# Altium footprint library MyPCBLib.PcbLib: 103 footprints (part 2 of 7)
Each footprint in its own frame and in the unit in brackets; x right, y up, seen from the top. Pads: shape width x height; smd on the part's side, far side on the other; paste and mask are expansions set on the pad; w line width, h text height; cw(c..) or ccw(c..) is an arc to the next point about the centre after c.
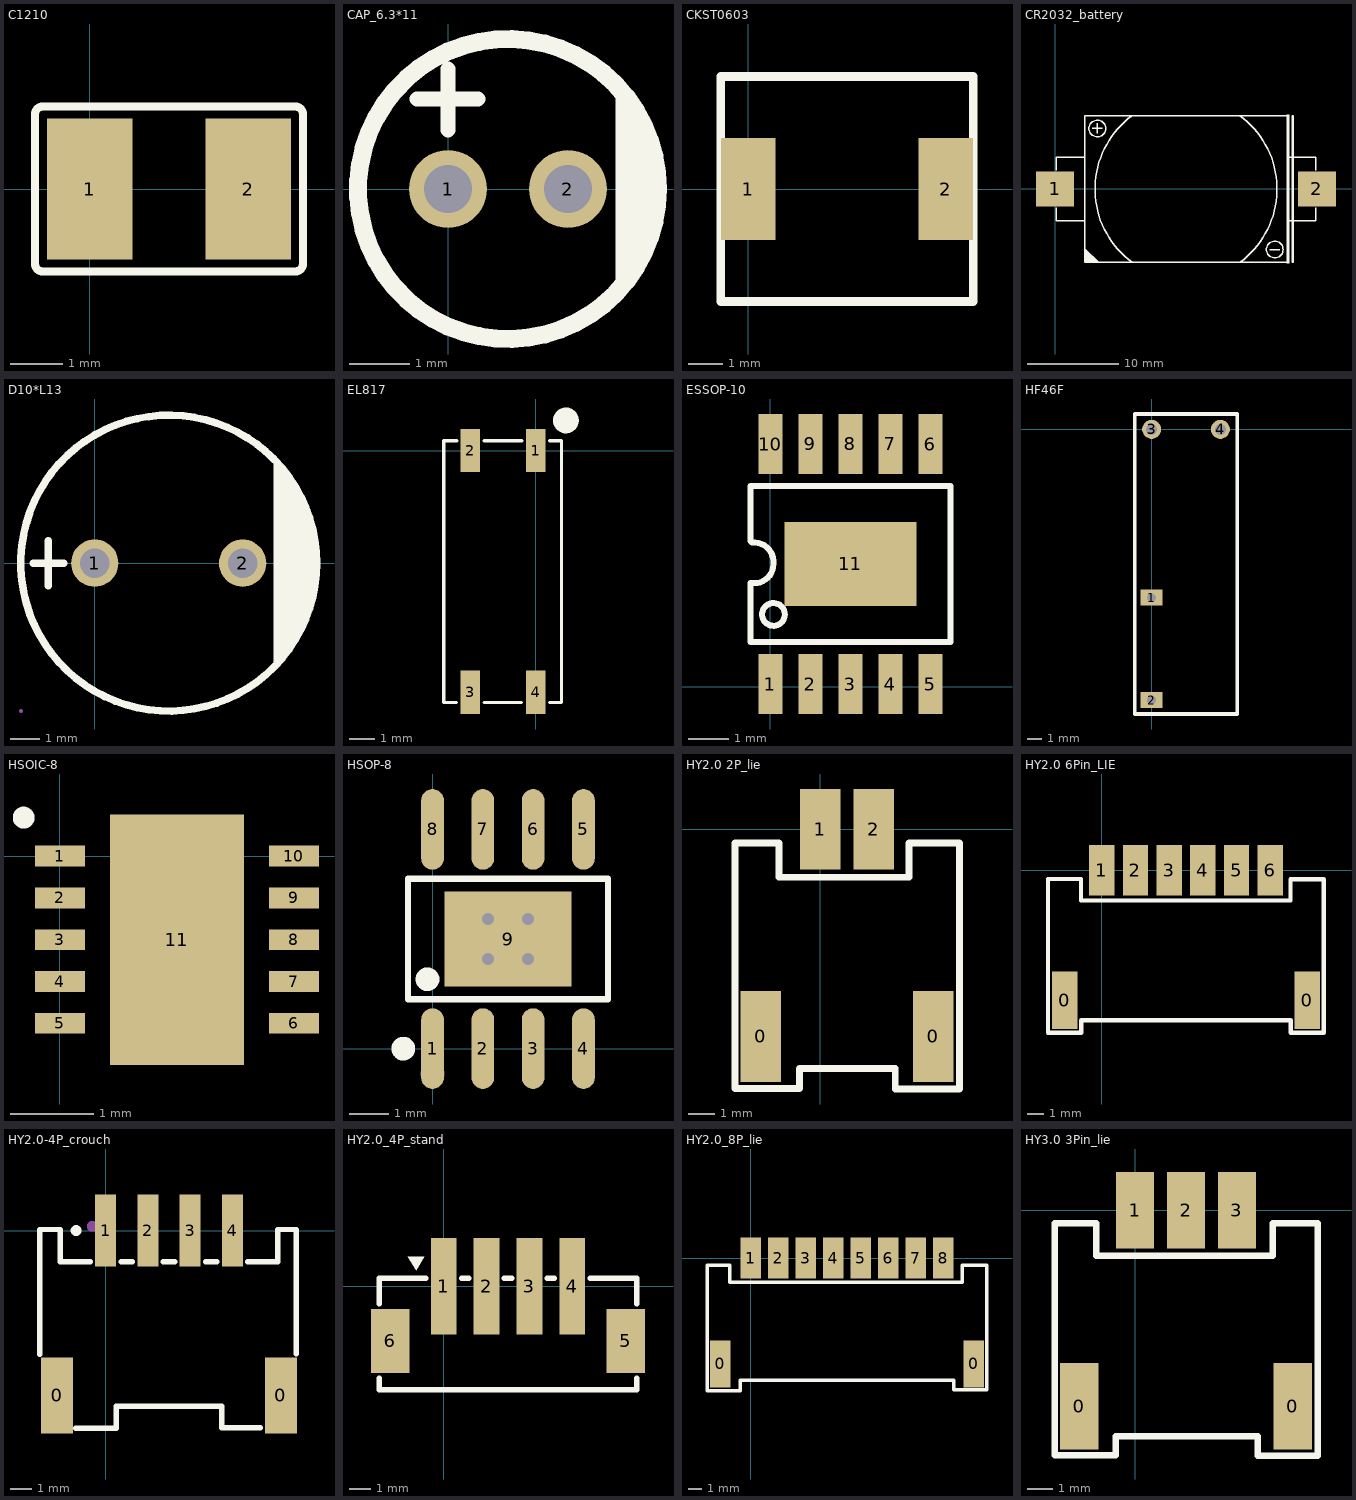
[diagram p1: the footprints below, top view; thin cyan lines are the x and y axes]

## C1210 [mm]
pads (2):
  rect 1.635x2.7 smd paste-100 mask+0.051: 1(0,0) 2(3.035,0)
Top Overlay:
  lines w0.152: -1.046,-1.426 ccw(c-0.894,-1.426) -0.894,-1.579 0.741,-1.579 2.294,-1.579 3.929,-1.579 ccw(c3.929,-1.426) 4.081,-1.426 4.081,1.426 ccw(c3.929,1.426) 3.929,1.579 2.294,1.579 0.741,1.579 -0.894,1.579 ccw(c-0.894,1.426) -1.046,1.426 -1.046,-1.426
Top Paste:
  region: 2.217,-1.25 2.217,-0.559 2.317,-0.459 2.673,-0.459 2.773,-0.359 2.773,0.359 2.673,0.459 2.317,0.459 2.217,0.559 2.217,1.25 2.317,1.35 3.752,1.35 3.852,1.25 3.852,-1.25 3.752,-1.35 2.317,-1.35
  region: 0.817,-1.25 0.817,-0.559 0.717,-0.459 0.361,-0.459 0.261,-0.359 0.261,0.359 0.361,0.459 0.717,0.459 0.817,0.559 0.817,1.25 0.717,1.35 -0.718,1.35 -0.818,1.25 -0.818,-1.25 -0.718,-1.35 0.717,-1.35

## CAP_6.3*11 [mm]
pads (2):
  round 1.3 hole 0.8: 1(0,0) 2(2,0)
Top Overlay:
  circle w0.3: c1,0 r2.5
  region: 2.794,1.651 2.961,1.491 3.225,1.111 3.407,0.685 3.5,0.231 3.5,-0.231 3.407,-0.685 3.225,-1.111 2.961,-1.491 2.794,-1.651
  lines w0.254: -0.516,1.5 0.5,1.5 ; 0,0.984 0,2

## CKST0603 [mm]
pads (2):
  rect 1.6x3 smd: 1(0,0) 2(5.8,0)
Top Overlay:
  lines w0.254: -0.8,-3.3 6.6,-3.3 6.6,3.3 -0.8,3.3 -0.8,-3.3
3D body: height 3, standoff 0, extent -0.8,-3.3 6.6,3.3

## CR2032_battery [mm]
pads (2):
  rect 4.2x3.8 smd: 1(0,0) 2(28.77,0)
Top Overlay:
  circle w0.152: c24.135,-6.65 r0.918
  circle w0.152: c4.635,6.65 r0.918
  region: 4.733,-8.076 3.259,-8.076 3.259,-6.604
  region: 25.435,8.152 25.435,1.932 25.74,1.932 25.74,8.152
  region: 25.435,-8.152 25.435,1.95 25.735,2 25.74,-1.932 25.74,-8.152
  lines w0.152: 0.135,-2.08 0.135,-3.5 3.259,-3.5 ; 0.135,2.08 0.135,3.5 3.259,3.5 ; 3.259,-6.614 4.721,-8.076 4.745,-8.076 ; 3.259,1.983 3.259,8.076 25.511,8.076 ; 3.259,2.057 3.259,-1.983 3.259,-8.076 25.511,-8.076 ; 4.085,6.65 5.185,6.65 ; 4.635,6.1 4.635,7.2 ; 8.48,-8.07 cw(c14.385,0) 8.489,8.077 ; 20.281,-8.077 ccw(c14.385,0) 20.29,8.07 ; 23.585,-6.65 24.685,-6.65 ; 25.511,-3.5 28.635,-3.5 28.635,-2.08 ; 25.511,3.5 28.635,3.5 28.635,2.08 ; 26.185,-8.074 26.035,-8.074 26.035,8.076 26.185,8.076 ; 26.185,-8.05 26.185,8.052

## D10*L13 [mm]
pads (2):
  round 1.6 hole 1 mask+0.05: 1(0,0) 2(5,0)
Top Overlay:
  circle w0.254: c2.5,0 r5
  region: 6.055,3.556 6.055,-3.556 6.817,-2.54 7.325,-1.016 7.579,0.508 7.325,1.524
  lines w0.254: -2.073,0 -1.057,0 ; -1.565,-0.762 -1.565,0.762
Mechanical 15:
  region: 0.3,0 0.3,0.06 0.254,0.17 0.17,0.254 0.059,0.3 -0.06,0.3 -0.17,0.254 -0.255,0.17 -0.3,0.06 -0.3,0 -0.3,-0.06 -0.255,-0.17 -0.17,-0.254 -0.06,-0.3 0.059,-0.3 0.17,-0.254 0.254,-0.17 0.3,-0.06
  region: 5.3,0 5.3,0.06 5.254,0.17 5.17,0.254 5.059,0.3 4.94,0.3 4.83,0.254 4.745,0.17 4.7,0.06 4.7,0 4.7,-0.06 4.745,-0.17 4.83,-0.254 4.94,-0.3 5.059,-0.3 5.17,-0.254 5.254,-0.17 5.3,-0.06
  region: -2.44,-5 -2.44,-4.975 -2.476,-4.94 -2.525,-4.94 -2.56,-4.975 -2.56,-5 -2.56,-5.025 -2.525,-5.06 -2.476,-5.06 -2.44,-5.025
  lines w0.051: -2.501,0 ccw(c2.499,0) 7.499,0 ccw(c2.499,0) -2.501,0

## EL817 [mm]
pads (4):
  rect 0.76x1.68 smd: 1(0,0) 2(-2.54,0) 3(-2.54,-9.39) 4(0,-9.39)
Top Overlay:
  circle w0.5: c1.177,1.168 r0.25
  lines w0.127: -3.085,-9.78 -3.569,-9.78 -3.569,0.381 -3.048,0.381 ; -1.999,0.383 -0.534,0.383 ; -1.995,-9.78 -0.545,-9.78 ; 0.544,0.379 1.01,0.379 1.01,-9.78 0.546,-9.78
3D body "User Library-EL817.step": height 4.68, standoff 0, extent -3.57,-9.78 1.01,0.38

## ESSOP-10 [mm]
pads (11):
  rect 0.6x1.5 smd paste+0 mask+0.05: 1(0.002,0.071) 2(1.002,0.071) 3(2.002,0.071) 4(3.002,0.071) 5(4.002,0.071) 6(4.002,6.071) 7(3.002,6.071) 8(2.002,6.071) 9(1.002,6.071) 10(0.002,6.071)
  rect 3.3x2.1 smd paste+0 mask+0.05: 11(2.002,3.071)
Top Overlay:
  circle w0.15: c0.082,1.811 r0.284
  lines w0.15: -0.458,3.611 cw(c-0.414,3.115) 0.082,3.071 cw(c-0.398,3.071) -0.398,2.591 -0.498,2.591 -0.498,1.121 4.502,1.121 4.502,5.021 -0.498,5.021 -0.498,3.891 -0.498,3.651 -0.458,3.611

## HF46F [mm]
pads (4):
  rect 1.5x1.1 hole 0.6 square: 1(0,-11.5) 2(0,-18.5)
  round 1.3 hole 0.75: 3(0,0) 4(4.7,0)
Top Overlay:
  lines w0.254: -1.15,-19.45 -1.15,1.05 5.85,1.05 5.85,-19.45 -1.15,-19.45
3D body: height 15.3, standoff 0, extent -1.15,-19.45 5.85,1.05

## HSOIC-8 [mil]
pads (11):
  rect 23.6x9.8 smd mask+2: 1(0,0) 2(0,-19.7) 3(0,-39.4) 4(0,-59.1) 5(0,-78.8) 6(110.2,-78.8) 7(110.2,-59.1) 8(110.2,-39.4) 9(110.2,-19.7) 10(110.2,0)
  rect 63x118.1 smd mask+2: 11(55.1,-39.4)
Top Overlay:
  circle w5.9: c-17.1,18.1 r2.2

## HSOP-8 [mil]
pads (9):
  oval 22.6x80.2 smd mask+2: 1(0,0) 2(50,0) 3(100,0) 4(150,0) 5(150,218) 6(100,218) 7(50,218) 8(0,218)
  rect 126x94.5 smd mask+2: 9(75,109)
via 94.7,89.3 diameter 24 hole 12
via 55.3,89.3 diameter 24 hole 12
via 94.7,128.7 diameter 24 hole 12
via 55.3,128.7 diameter 24 hole 12
Top Overlay:
  circle w11.8: c-29.1,0 r5.9
  circle w11.8: c-5,69 r5.9
  lines w6: -24.5,49.1 174.5,49.1 174.5,168.9 -24.5,168.9 -24.5,49.1
Mechanical 6:
  circle w11.8: c0,-24.9 r5.9

## HY2.0 2P_lie [mm]
pads (4):
  rect 1.5x3.4 smd: 0(-2.2,-7.7) 0(4.2,-7.7)
  rect 1.5x3 smd: 1(0,0) 2(2,0)
Top Overlay:
  lines w0.254: -3.17,-9.636 -0.762,-9.636 -0.762,-8.89 2.794,-8.89 2.794,-9.652 5.18,-9.652 5.18,-9.636 5.18,-0.508 5.08,-0.508 3.302,-0.508 3.302,-1.778 -0.889,-1.778 -1.524,-1.778 -1.524,-0.508 -3.17,-0.508 -3.17,-9.636

## HY2.0 6Pin_LIE [mm]
pads (8):
  rect 1.5x3.4 smd: 0(-2.2,-7.7) 0(12.2,-7.7)
  rect 1.5x3 smd: 1(0,0) 2(2,0) 3(4,0) 4(6,0) 5(8,0) 6(10,0)
Top Overlay:
  lines w0.254: -3.183,-9.636 -3.183,-0.508 -1.23,-0.508 -1.23,-1.778 -0.889,-1.778 5.409,-1.778 7.626,-1.778 11.197,-1.778 11.197,-0.529 13.174,-0.529 13.174,-9.634 11.216,-9.634 11.216,-8.89 10.795,-8.89 4.826,-8.89 2.794,-8.89 -1.221,-8.89 -1.221,-9.636 -3.183,-9.636

## HY2.0-4P_crouch [mm]
pads (6):
  rect 1.5x3.6 smd: 0(-2.3,-7.8) 0(8.3,-7.8)
  rect 1x3.4 smd: 1(0,0) 2(2,0) 3(4,0) 4(6,0)
Top Overlay:
  circle w0.254: c-1.397,0 r0.127
  lines w0.254: -3.11,-5.85 -3.11,0.05 ; -3.11,0.049 -2.14,0.049 -2.14,-1.47 -0.731,-1.47 ; -1.41,-9.35 0.5,-9.35 0.5,-8.31 5.49,-8.31 5.49,-9.33 7.319,-9.33 ; 0.731,-1.47 1.269,-1.47 ; 2.731,-1.47 3.269,-1.47 ; 4.731,-1.47 5.269,-1.47 ; 6.731,-1.47 8.15,-1.47 8.15,-0.07 8.15,0.053 9.03,0.053 9.03,-0.07 9.03,-5.83
Mechanical 15:
  circle w0.254: c-0.63,0.2 r0.127

## HY2.0_4P_stand [mm]
pads (6):
  rect 1.2x4.5 smd: 1(0,0) 2(2,0) 3(4,0) 4(6,0)
  rect 1.8x3 smd: 5(8.5,-2.55) 6(-2.5,-2.55)
Top Overlay:
  region: -1.288,0.754 -0.907,1.389 -1.669,1.389
  lines w0.254: -3,-4.281 -3,-4.831 8.969,-4.831 ; -3,-0.819 -3,0.376 -0.831,0.376 ; 0.831,0.376 1.169,0.376 ; 2.831,0.376 3.169,0.376 ; 4.831,0.376 5.169,0.376 ; 6.83,0.376 8.75,0.376 9,0.376 9,-0.819 ; 9,-4.831 9,-4.281

## HY2.0_8P_lie [mm]
pads (10):
  rect 1.5x3.4 smd: 0(-2.2,-7.7) 0(16.2,-7.7)
  rect 1.5x3 smd: 1(0,0) 2(2,0) 3(4,0) 4(6,0) 5(8,0) 6(10,0) 7(12,0) 8(14,0)
Top Overlay:
  lines w0.254: -3.17,-9.636 -3.17,-0.508 -1.524,-0.508 -1.524,-1.778 -0.889,-1.778 5.409,-1.778 7.626,-1.778 11.557,-1.778 15.367,-1.778 15.367,-0.508 17.142,-0.508 17.142,-9.583 14.768,-9.583 14.768,-8.89 10.795,-8.89 4.826,-8.89 2.794,-8.89 -0.762,-8.89 -0.762,-9.636 -3.17,-9.636

## HY3.0 3Pin_lie [mm]
pads (5):
  rect 1.5x3.4 smd: 0(-2.2,-7.7) 0(6.2,-7.7)
  rect 1.5x3 smd: 1(0,0) 2(2,0) 3(4,0)
Top Overlay:
  lines w0.254: -3.17,-9.636 -3.17,-0.508 -1.524,-0.508 -1.524,-1.778 -0.889,-1.778 5.409,-1.778 5.409,-0.508 7.186,-0.508 7.186,-9.652 4.826,-9.652 4.826,-8.89 2.794,-8.89 -0.762,-8.89 -0.762,-9.636 -3.17,-9.636